# Altium footprint library KM_ALTIUM.PcbLib: 265 footprints (part 11 of 17)
Each footprint in its own frame and in the unit in brackets; x right, y up, seen from the top. Pads: shape width x height; smd on the part's side, far side on the other; paste and mask are expansions set on the pad; w line width, h text height; cw(c..) or ccw(c..) is an arc to the next point about the centre after c.
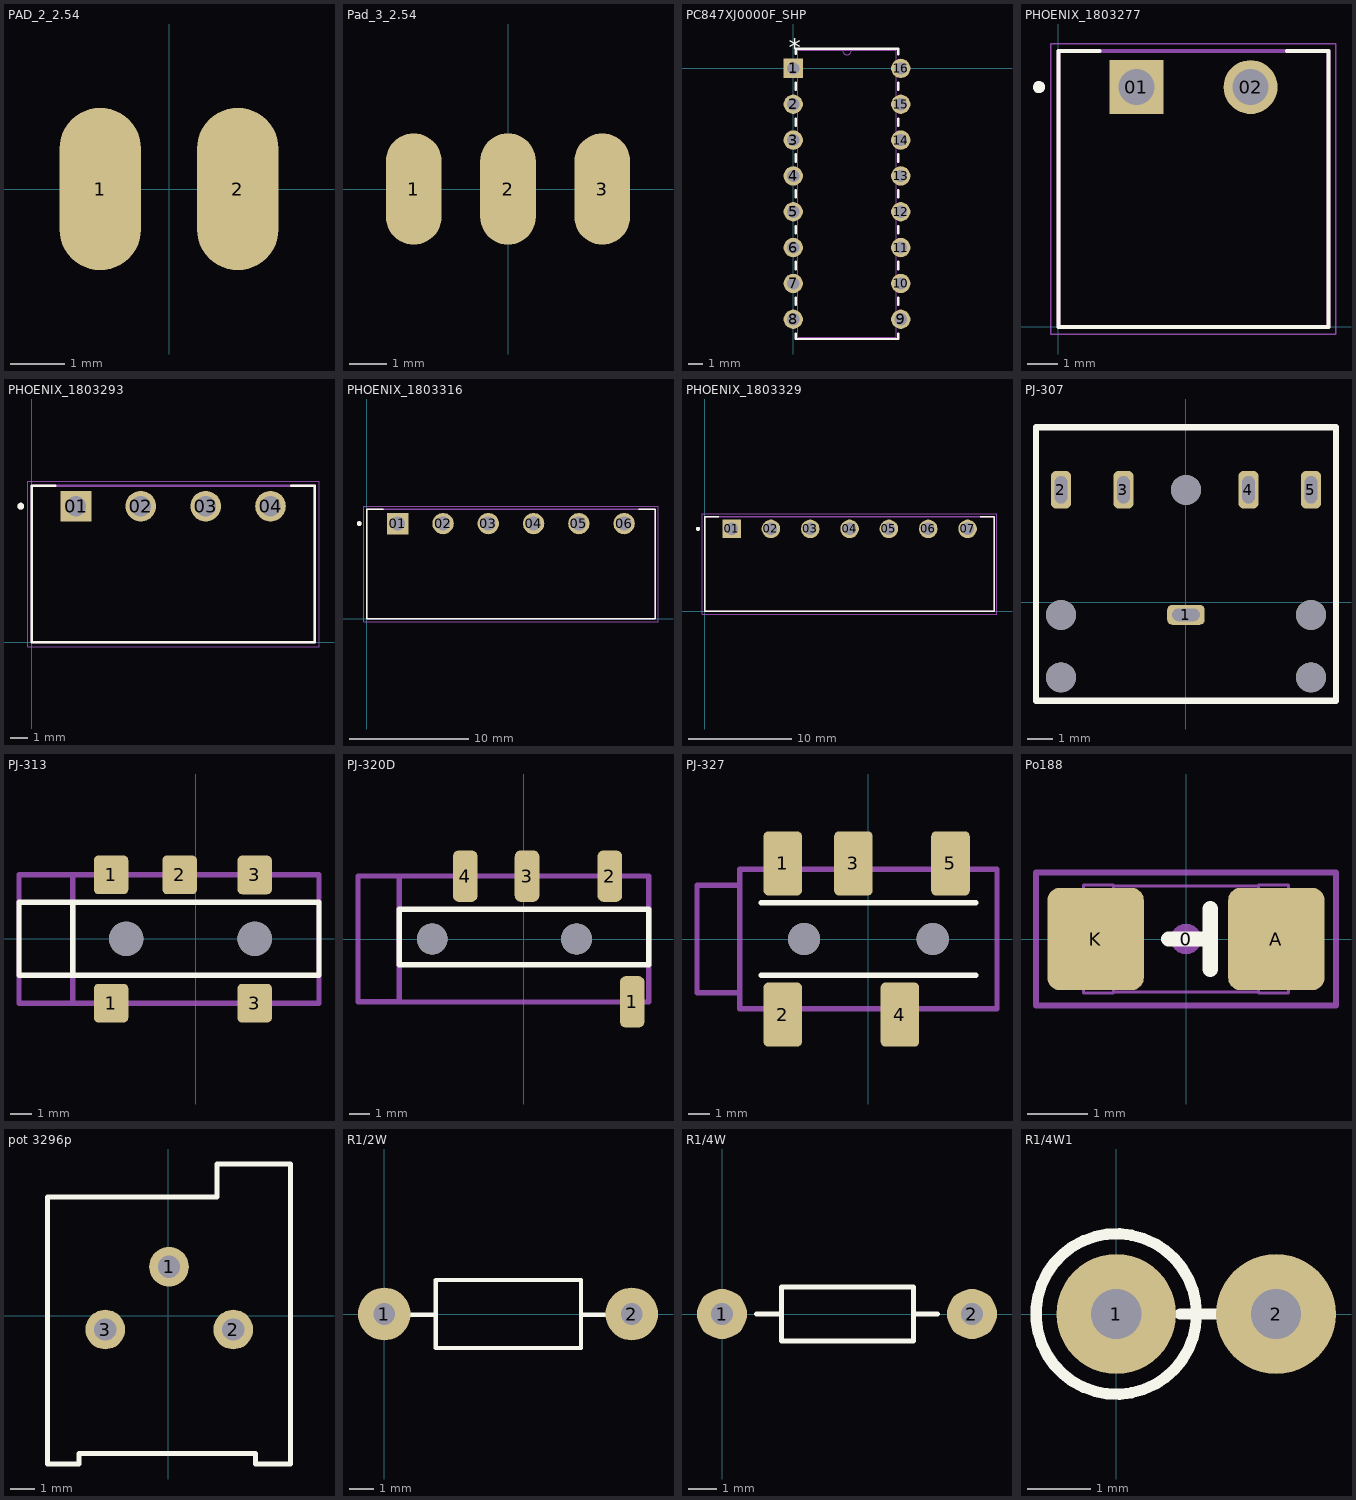
[diagram p10: the footprints below, top view; thin cyan lines are the x and y axes]

## PAD_2_2.54 [mm]
pads (2):
  oval 1.5x3 smd: 1(-1.27,0) 2(1.27,0)

## Pad_3_2.54 [mm]
pads (3):
  oval 1.5x3 smd: 1(-2.54,0) 2(0,0) 3(2.54,0)

## PC847XJ0000F_SHP [mil]
pads (16):
  rect 54x54 hole 34 paste-27 mask+0: 1(0,0)
  round 54 hole 34 paste-27 mask+0: 2(0,-100) 3(0,-200) 4(0,-300) 5(0,-400) 6(0,-500) 7(0,-600) 8(0,-700) 9(300,-700) 10(300,-600) 11(300,-500) 12(300,-400) 13(300,-300) 14(300,-200) 15(300,-100) 16(300,0)
Top Overlay:
  lines w6: 7,-739.48 7,-755 293,-755 293,-739.48 ; 7,-660.52 7,-639.48 ; 7,-560.52 7,-539.48 ; 7,-460.52 7,-439.48 ; 7,-360.52 7,-339.48 ; 7,-260.52 7,-239.48 ; 7,-160.52 7,-139.48 ; 7,-60.52 7,-40.1 ; 7,40.1 7,55 293,55 293,39.48 ; 293,-660.52 293,-639.48 ; 293,-560.52 293,-539.48 ; 293,-460.52 293,-439.48 ; 293,-360.52 293,-339.48 ; 293,-260.52 293,-239.48 ; 293,-160.52 293,-139.48 ; 293,-60.52 293,-39.48
  text "*" at -12.5,32 h50
Mechanical 13:
  lines w1: 138,50 ccw(c150,50) 162,50 ; -17,-717 -17,-683 12,-683 12,-717 -17,-717 ; -17,-617 -17,-583 12,-583 12,-617 -17,-617 ; -17,-517 -17,-483 12,-483 12,-517 -17,-517 ; -17,-417 -17,-383 12,-383 12,-417 -17,-417 ; -17,-317 -17,-283 12,-283 12,-317 -17,-317 ; -17,-217 -17,-183 12,-183 12,-217 -17,-217 ; -17,-117 -17,-83 12,-83 12,-117 -17,-117 ; -17,-17 -17,17 12,17 12,-17 -17,-17 ; 12,-750 288,-750 288,50 12,50 12,-750 ; 288,-717 288,-683 317,-683 317,-717 288,-717 ; 288,-617 288,-583 317,-583 317,-617 288,-617 ; 288,-517 288,-483 317,-483 317,-517 288,-517 ; 288,-417 288,-383 317,-383 317,-417 288,-417 ; 288,-317 288,-283 317,-283 317,-317 288,-317 ; 288,-217 288,-183 317,-183 317,-217 288,-217 ; 288,-117 288,-83 317,-83 317,-117 288,-117 ; 288,-17 288,17 317,17 317,-17 288,-17
  text "*" at 9.5,-25 h50
3D body "PC847XJ0000F_SHP.step": height 182.09, standoff -100, extent -5,-750 315,50

## PHOENIX_1803277 [mm]
pads (2):
  rect 1.8x1.8 / inner round 1.8 / far side rect 1.8x1.8 hole 1.2: 01(2.6,8)
  round 1.8 hole 1.2: 02(6.41,8)
Top Overlay:
  circle w0.2: c-0.65,8 r0.1
  lines w0.127: 1.38,9.2 0,9.2 0,0 9.01,0 9.01,9.2 7.63,9.2
Mechanical 13:
  circle w0.2: c-0.65,8 r0.1
  lines w0.127: 0,0 0,9.2 9.01,9.2 9.01,0 0,0
Mechanical 15:
  lines w0.05: -0.25,-0.25 -0.25,9.45 9.26,9.45 9.26,-0.25 -0.25,-0.25
3D body "step_temp.STEP": height 7.4, standoff -3.6, extent 0,0 9.01,9.2

## PHOENIX_1803293 [mm]
pads (4):
  rect 1.8x1.8 / inner round 1.8 / far side rect 1.8x1.8 hole 1.2: 01(2.6,8)
  round 1.8 hole 1.2: 02(6.41,8) 03(10.22,8) 04(14.03,8)
Top Overlay:
  circle w0.2: c-0.65,8 r0.1
  lines w0.127: 1.38,9.2 0,9.2 0,0 16.63,0 16.63,9.2 15.25,9.2
Mechanical 13:
  circle w0.2: c-0.65,8 r0.1
  lines w0.127: 0,0 0,9.2 16.63,9.2 16.63,0 0,0
Mechanical 15:
  lines w0.05: -0.25,-0.25 -0.25,9.45 16.88,9.45 16.88,-0.25 -0.25,-0.25
3D body "step_temp.STEP": height 7.12, standoff -3.52, extent 0.067,0.071 16.697,9.271

## PHOENIX_1803316 [mm]
pads (6):
  rect 1.8x1.8 / inner round 1.8 / far side rect 1.8x1.8 hole 1.2: 01(2.6,8)
  round 1.8 hole 1.2: 02(6.41,8) 03(10.22,8) 04(14.03,8) 05(17.84,8) 06(21.65,8)
Top Overlay:
  circle w0.2: c-0.65,8 r0.1
  lines w0.127: 1.38,9.2 0,9.2 0,0 24.25,0 24.25,9.2 22.87,9.2
Mechanical 13:
  circle w0.2: c-0.65,8 r0.1
  lines w0.127: 0,0 0,9.2 24.25,9.2 24.25,0 0,0
Mechanical 15:
  lines w0.05: -0.25,-0.25 -0.25,9.45 24.5,9.45 24.5,-0.25 -0.25,-0.25
3D body "step_temp.STEP": height 7.4, standoff -3.6, extent 0,0 24.25,9.2

## PHOENIX_1803329 [mm]
pads (7):
  rect 1.8x1.8 / inner round 1.8 / far side rect 1.8x1.8 hole 1.2: 01(2.6,8)
  round 1.8 hole 1.2: 02(6.41,8) 03(10.22,8) 04(14.03,8) 05(17.84,8) 06(21.65,8) 07(25.46,8)
Top Overlay:
  circle w0.2: c-0.65,8 r0.1
  lines w0.127: 1.38,9.2 0,9.2 0,0 28.06,0 28.06,9.2 26.68,9.2
Mechanical 13:
  circle w0.2: c-0.65,8 r0.1
  lines w0.127: 0,0 28.06,0 28.06,9.2 0,9.2 0,0
Mechanical 15:
  lines w0.05: -0.25,-0.25 28.31,-0.25 28.31,9.45 -0.25,9.45 -0.25,-0.25
3D body "1803329.stp": height 7.25, standoff -3.4, extent -0.013,0 28.047,9.2

## PJ-307 [mm]
pads (10):
  rrect50% 1.5x0.8 hole 0.5 slot 1.1 at 0 deg: 1(0,-0.5)
  rrect50% 0.8x1.5 hole 0.5 slot 1.1 at 90 deg: 2(-5,4.5) 3(-2.5,4.5) 4(2.5,4.5) 5(5,4.5)
  round 1.2 hole 1.2: ""(-5,-3) ""(-5,-0.5) ""(0,4.5) ""(5,-3) ""(5,-0.5)
Top Overlay:
  lines w0.254: 5.969,-3.937 -6,-3.937 -6,7 6,7 6,-3.937
3D body "PJ-307--3DModel-STEP-510211.STEP": height 5.5, standoff -3.5, extent -6,-7 6,7

## PJ-313 [mm]
pads (7):
  rrect25% 1.6x1.8 smd: 1(-3.95,-3) 1(-3.95,2.987) 2(-0.75,2.987) 3(2.75,-3) 3(2.75,2.981)
  round 1.6 hole 1.6: ""(-3.25,0) ""(2.75,0)
Top Overlay:
  lines w0.254: -5.75,-1.702 -5.75,1.676 ; -8.25,-1.702 5.75,-1.702 5.75,1.702 -8.25,1.702 -8.25,-1.702
Mechanical 1:
  lines w0.254: -5.75,-2.921 -5.75,3 ; -8.25,-3 5.75,-3 5.75,3 -8.25,3 -8.25,-3
3D body "User Library-Jack Audio 3_5 Female.STEP": height 8.52, standoff 0.51, extent -8.245,-3.284 5.755,3.302

## PJ-320D [mm]
pads (6):
  rrect50% 1.2x2.5 smd: 1(5.25,-3.05) 2(4.166,3.05) 3(0.15,3.05) 4(-2.85,3.05)
  round 1.5 hole 1.5 unplated: ""(-4.45,0) ""(2.55,0)
Top Overlay:
  lines w0.254: -6.05,-1.245 6.05,-1.245 6.05,1.448 -6.05,1.448 -6.05,-1.245
Mechanical 3:
  lines w0.254: -6.05,-3.05 6.05,-3.05 6.05,3.05 -6.05,3.05 ; -6.05,3.05 -8.05,3.05 -8.05,-3.048 -6.05,-3.048 -6.05,3.05
Mechanical 13:
  lines w0.254: -6.05,-3.05 6.05,-3.05 6.05,3.05 -6.05,3.05 ; -6.05,3.05 -6.05,-3.048 -8.05,-3.048 -8.05,3.05 -6.05,3.05
3D body "sj2-3574a-smt-tr.stp": height 6.3, standoff 0.5, extent -8.008,-4.191 6.992,4.209

## PJ-327 [mm]
pads (7):
  rrect25% 1.8x3 smd: 1(-4,3.525) 2(-4,-3.525) 3(-0.7,3.525) 4(1.47,-3.525) 5(3.83,3.525)
  round 1.5 hole 1.5: ""(-3,0) ""(3,0)
Top Overlay:
  lines w0.254: -5,-1.7 5,-1.7 ; -5,1.7 5,1.7
Mechanical 1:
  lines w0.254: -6,-2.5 -8,-2.5 -8,2.5 -6,2.5 ; -6,-3.25 -6,3.25 6,3.25 6,-3.25 -6,-3.25
3D body "sj-3503-smt.stp": height 5.61, standoff -0.29, extent -8.031,-4.275 5.969,4.325

## Po188 [mm]
pads (3):
  round 0.508 on Mech15: 0(0,0)
  rrect25% 1.6x1.7 smd: A(1.5,0) K(-1.5,0)
Top Overlay:
  lines w0.254: -0.292,0 0.33,0 ; 0.4,-0.5 0.4,0.5
Mechanical 13:
  lines w0.05: -1.2,-0.88 1.2,-0.88 ; -1.2,0.88 1.2,0.88 ; -1.7,-0.9 -1.7,0.9 -1.2,0.9 -1.2,-0.9 -1.7,-0.9 ; 1.2,-0.9 1.2,0.9 1.7,0.9 1.7,-0.9 1.2,-0.9
Mechanical 15:
  lines w0.1: -2.489,-1.1 2.489,-1.1 2.489,1.1 -2.489,1.1 -2.489,-1.1

## pot 3296p [mm]
pads (3):
  round 1.6 hole 0.9: 1(0.025,1.981) 2(2.617,-0.55) 3(-2.54,-0.55)
Top Overlay:
  lines w0.2: -4.877,-5.969 -3.607,-5.969 -3.607,-5.537 -2.946,-5.537 2.845,-5.537 3.505,-5.537 3.505,-5.969 4.928,-5.969 4.928,6.121 2.654,6.121 1.956,6.121 1.956,4.801 -1.524,4.801 -4.877,4.801 -4.877,-5.969
3D body "User Library-Trimming Potentiometer Horizontal 3296P 503 - 50k.STEP": height 4.35, standoff -8.71, extent -4.729,-5.815 4.801,5.815

## R1/2W [mil] "R 1/2W, 2 pin, 300mil"
height 100
pads (2):
  round 85 hole 35: 1(0,0) 2(400,0)
Top Overlay:
  lines w7: 42,-1 83,-1 ; 318,-1 356,-1 ; 83,-55 83,55 318,55 318,-55 83,-55
3D body "SW3dPS-AXIAL_RESISTOR(0.25W).STEP": height 91.42, standoff -70, extent -11.6,-45.49 413.6,49

## R1/4W [mil] "R 1/4W, 2 Pin, 350mil"
height 100
pads (2):
  round 70 hole 31: 1(0,0) 2(350,0)
Top Overlay:
  lines w7: 48,0 83,0 ; 268,0 302,0 ; 83,-38 268,-38 268,38 83,38 83,-38
3D body "SW3dPS-AXIAL_RESISTOR(0.25W).STEP": height 111.42, standoff -50, extent -39.6,-47 385.6,47.49

## R1/4W1 [mm] "R 1/4W, 2 Pin, 150mil"
height 2.54
pads (2):
  round 1.905 hole 0.8: 1(0,0) 2(2.54,0)
Top Overlay:
  circle w0.178: c0,0 r1.276
  lines w0.178: 1.016,0 1.651,0
3D body "SW3dPS-Res_Stand.STEP": height 7.3, standoff -1.45, extent -0.889,-0.92 2.823,0.92